# Altium integrated library WE-FLEX_EFD20.IntLib: 1 symbol
Pins are listed as number, name and electrical type; pins without a type are passive.

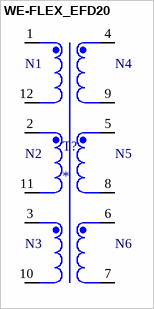
[diagram p0: symbol WE-FLEX_EFD20]

## WE-FLEX_EFD20
designator T?
Flexible For Configurable (For DC/DC) SMPS Transformer 500VDC Isolation Surface Mount; MF: WÃ¼rth Elektronik; MP: 749196521; SnapEDA_Link: https://www.snapeda.com/parts/749196521/W%25C3%25BCrth+Elektronik+Midcom/view-part/?ref=snap; Package: None; Value: *; Check_prices: https://www.snapeda.com/parts/749196521/W%25C3%25BCrth+Elektronik+Midcom/view-part/?ref=eda
footprint WE-FLEX_EFD20
pins: 1, 2, 3, 4, 5, 6, 7, 8, 9, 10, 11, 12
text: N1; N4; N2; N5; N3; N6